# Altium footprint library LimeMicroAltiumLib.PcbLib: 876 footprints (part 14 of 57)
Each footprint in its own frame and in the unit in brackets; x right, y up, seen from the top. Pads: shape width x height; smd on the part's side, far side on the other; paste and mask are expansions set on the pad; w line width, h text height; cw(c..) or ccw(c..) is an arc to the next point about the centre after c.
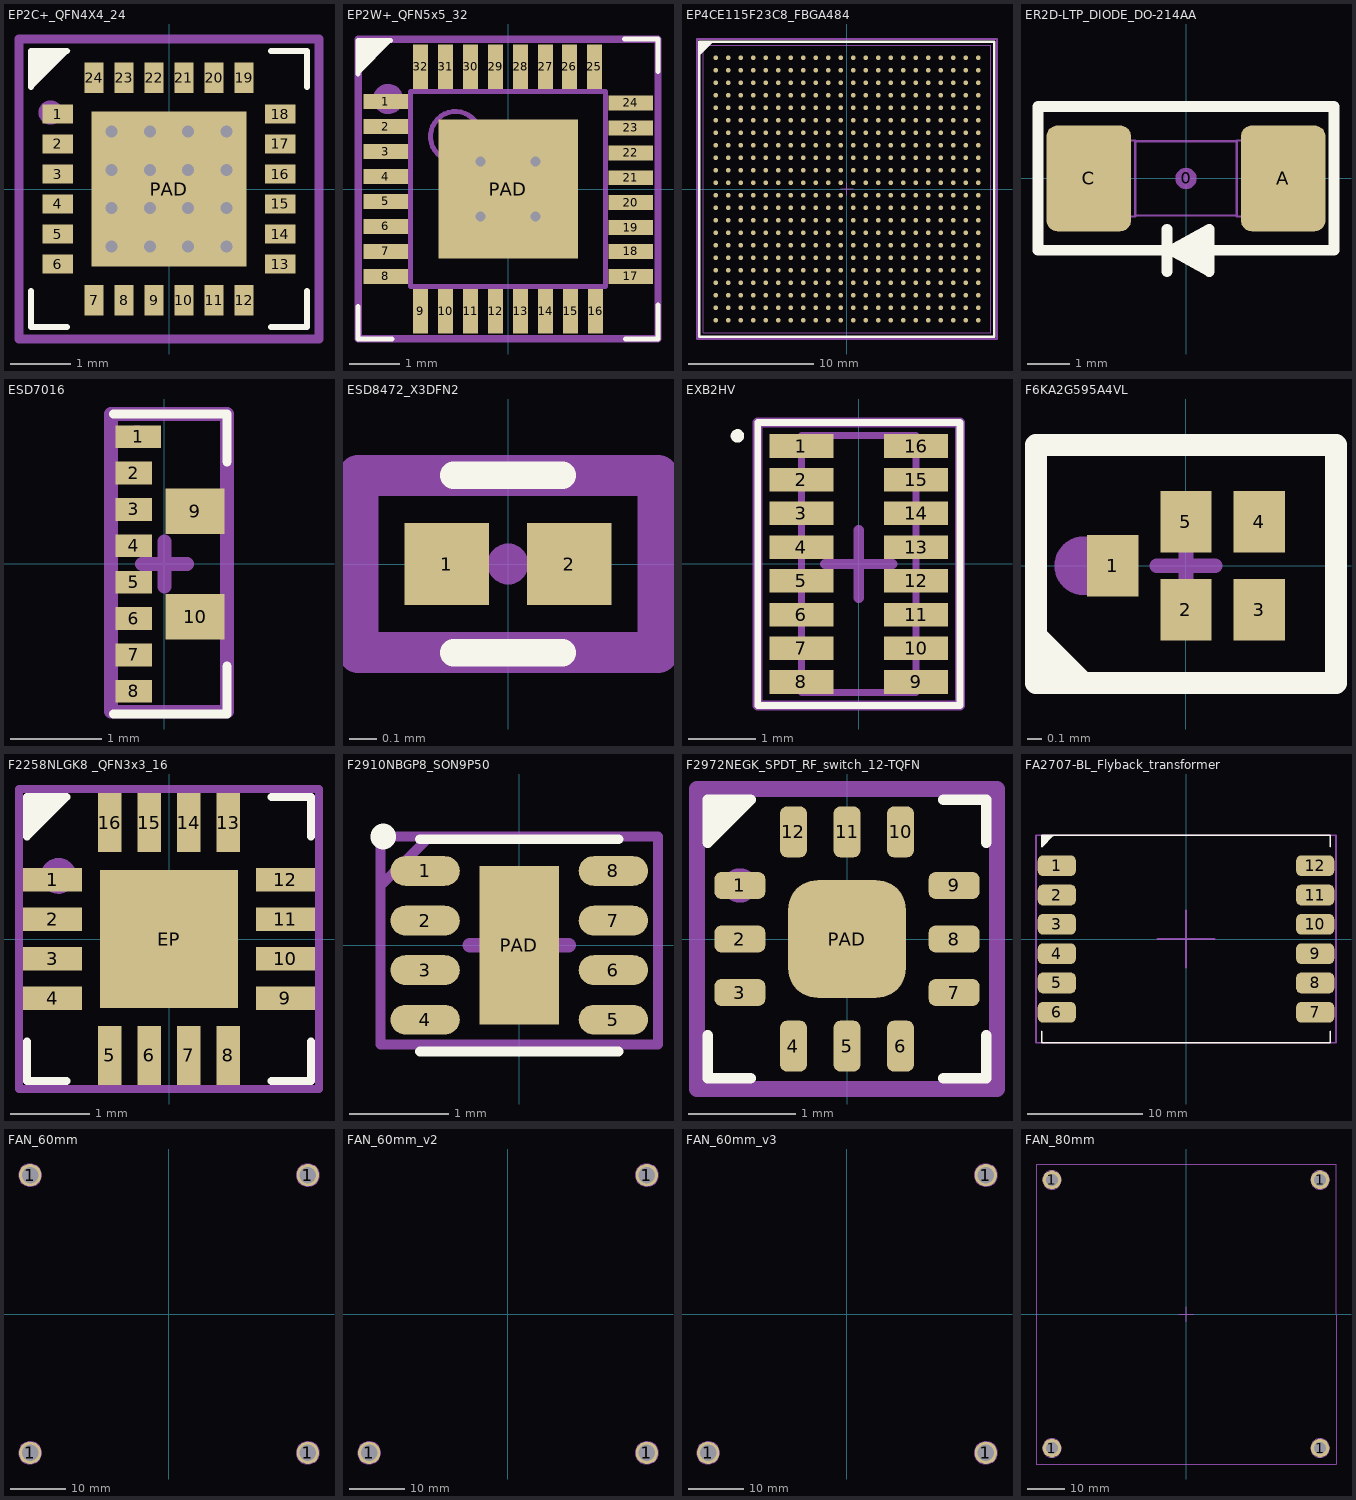
[diagram p13: the footprints below, top view; thin cyan lines are the x and y axes]

## EP2C+_QFN4X4_24 [mm]
pads (25):
  rect 0.51x0.31 smd mask+0.05: 1(-1.855,1.25) 2(-1.855,0.75) 3(-1.855,0.25) 4(-1.855,-0.25) 5(-1.855,-0.75) 6(-1.855,-1.25) 13(1.855,-1.25) 14(1.855,-0.75) 15(1.855,-0.25) 16(1.855,0.25) 17(1.855,0.75) 18(1.855,1.25)
  rect 0.31x0.51 smd mask+0.05: 7(-1.25,-1.855) 8(-0.75,-1.855) 9(-0.25,-1.855) 10(0.25,-1.855) 11(0.75,-1.855) 12(1.25,-1.855) 19(1.25,1.855) 20(0.75,1.855) 21(0.25,1.855) 22(-0.25,1.855) 23(-0.75,1.855) 24(-1.25,1.855)
  rect 2.59x2.59 smd mask+0.05: PAD(0,0)
via -0.96,0.96 diameter 0.4 hole 0.2
via -0.32,0.96 diameter 0.4 hole 0.2
via 0.32,0.96 diameter 0.4 hole 0.2
via 0.96,0.96 diameter 0.4 hole 0.2
via -0.96,0.32 diameter 0.4 hole 0.2
via -0.32,0.32 diameter 0.4 hole 0.2
via 0.32,0.32 diameter 0.4 hole 0.2
via 0.96,0.32 diameter 0.4 hole 0.2
via 0.96,-0.32 diameter 0.4 hole 0.2
via 0.96,-0.96 diameter 0.4 hole 0.2
via 0.32,-0.32 diameter 0.4 hole 0.2
via 0.32,-0.96 diameter 0.4 hole 0.2
via -0.96,-0.96 diameter 0.4 hole 0.2
via -0.32,-0.96 diameter 0.4 hole 0.2
via -0.32,-0.32 diameter 0.4 hole 0.2
via -0.96,-0.32 diameter 0.4 hole 0.2
Top Overlay:
  region: -2.3,2.3 -1.65,2.3 -2.3,1.65
  lines w0.1: -2.3,-1.7 -2.3,-2.3 -1.7,-2.3 ; -2.3,1.7 -2.3,2.3 -1.7,2.3 ; 1.7,-2.3 2.3,-2.3 2.3,-1.7 ; 1.7,2.3 2.3,2.3 2.3,1.7
Mechanical 15:
  circle w0.3: c-1.975,1.275 r0.05
  lines w0.15: -0.2,0 0.2,0 ; 0,-0.2 0,0.2 ; -2.5,-2.5 -2.5,2.5 2.5,2.5 2.5,-2.5 -2.5,-2.5
  text ".Designator" at 0,0 h0.55
3D body "User Library-QFN 24 4x4.step": height 0.9, standoff 0, extent -2.002,-2.002 2.002,2.002

## EP2W+_QFN5x5_32 [mm] "QFN, 24-Leads, Body 4,00x4,00mm, Pitch 0,50mm, Thermal Pad 2,55x2,55mm, IPC Medium Density"
height 0.8
pads (33):
  rect 0.89x0.3 smd mask+0.05: 1(-2.45,1.75) 2(-2.45,1.25) 3(-2.45,0.75) 4(-2.45,0.25) 5(-2.45,-0.25) 6(-2.45,-0.75) 7(-2.45,-1.25) 8(-2.45,-1.75) 17(2.45,-1.75) 18(2.45,-1.25) 19(2.45,-0.775) 20(2.45,-0.275) 21(2.45,0.225) 22(2.45,0.725) 23(2.45,1.225) 24(2.45,1.725)
  rect 0.3x0.89 smd mask+0.05: 9(-1.75,-2.45) 10(-1.25,-2.45) 11(-0.75,-2.45) 12(-0.25,-2.45) 13(0.25,-2.45) 14(0.75,-2.45) 15(1.25,-2.45) 16(1.75,-2.45) 25(1.725,2.45) 26(1.225,2.45) 27(0.75,2.45) 28(0.25,2.45) 29(-0.25,2.45) 30(-0.75,2.45) 31(-1.25,2.45) 32(-1.75,2.45)
  rect 2.79x2.79 smd paste+0.405 mask+0.405: PAD(0,0)
via -0.55,0.55 diameter 0.5 hole 0.2
via 0.55,0.55 diameter 0.5 hole 0.2
via -0.55,-0.55 diameter 0.5 hole 0.2
via 0.55,-0.55 diameter 0.5 hole 0.2
Top Overlay:
  region: -3,2.275 -2.313,2.962 -3,2.963
  lines w0.1: -3,-2.35 -3,-3 -2.325,-3 ; -3,2.3 -3,2.975 -2.35,2.975 ; 2.325,3 3,3 3,2.35 ; 2.35,-3 3,-3 3,-2.325
Mechanical 13:
  circle w0.1: c-1.05,1.05 r0.5
  lines w0.1: -1.95,-1.95 -1.95,1.95 1.95,1.95 1.95,-1.95 -1.95,-1.95
Mechanical 15:
  circle w0.4: c-2.4,1.8 r0.1
  lines w0.15: -0.5,0 0.5,0 ; 0,-0.5 0,0.5 ; -3,-3 -3,3 3,3 3,-3 -3,-3
  text ".Designator" at 0,0 h0.55
3D body "User Library-qfn32-5x5.step": height 0.8, standoff 0, extent -2.52,-2.51 2.501,2.51

## EP4CE115F23C8_FBGA484 [mm] "BGA, 484-Leads, Body 23x23mm, Pitch 1mm"
pads (484):
  round 0.38 smd: A1(-10.5,10.5) A2(-9.5,10.5) A3(-8.5,10.5) A4(-7.5,10.5) A5(-6.5,10.5) A6(-5.5,10.5) A7(-4.5,10.5) A8(-3.5,10.5) A9(-2.5,10.5) A10(-1.5,10.5) A11(-0.5,10.5) A12(0.5,10.5) A13(1.5,10.5) A14(2.5,10.5) A15(3.5,10.5) A16(4.5,10.5) A17(5.5,10.5) A18(6.5,10.5) A19(7.5,10.5) A20(8.5,10.5) A21(9.5,10.5) A22(10.5,10.5) AA1(-10.5,-9.5) AA2(-9.5,-9.5) AA3(-8.5,-9.5) AA4(-7.5,-9.5) AA5(-6.5,-9.5) AA6(-5.5,-9.5) AA7(-4.5,-9.5) AA8(-3.5,-9.5) AA9(-2.5,-9.5) AA10(-1.5,-9.5) AA11(-0.5,-9.5) AA12(0.5,-9.5) AA13(1.5,-9.5) AA14(2.5,-9.5) AA15(3.5,-9.5) AA16(4.5,-9.5) AA17(5.5,-9.5) AA18(6.5,-9.5) AA19(7.5,-9.5) AA20(8.5,-9.5) AA21(9.5,-9.5) AA22(10.5,-9.5) AB1(-10.5,-10.5) AB2(-9.5,-10.5) AB3(-8.5,-10.5) AB4(-7.5,-10.5) AB5(-6.5,-10.5) AB6(-5.5,-10.5) AB7(-4.5,-10.5) AB8(-3.5,-10.5) AB9(-2.5,-10.5) AB10(-1.5,-10.5) AB11(-0.5,-10.5) AB12(0.5,-10.5) AB13(1.5,-10.5) AB14(2.5,-10.5) AB15(3.5,-10.5) AB16(4.5,-10.5) AB17(5.5,-10.5) AB18(6.5,-10.5) AB19(7.5,-10.5) AB20(8.5,-10.5) AB21(9.5,-10.5) AB22(10.5,-10.5) B1(-10.5,9.5) B2(-9.5,9.5) B3(-8.5,9.5) B4(-7.5,9.5) B5(-6.5,9.5) B6(-5.5,9.5) B7(-4.5,9.5) B8(-3.5,9.5) B9(-2.5,9.5) B10(-1.5,9.5) B11(-0.5,9.5) B12(0.5,9.5) B13(1.5,9.5) B14(2.5,9.5) B15(3.5,9.5) B16(4.5,9.5) B17(5.5,9.5) B18(6.5,9.5) B19(7.5,9.5) B20(8.5,9.5) B21(9.5,9.5) B22(10.5,9.5) C1(-10.5,8.5) C2(-9.5,8.5) C3(-8.5,8.5) C4(-7.5,8.5) C5(-6.5,8.5) C6(-5.5,8.5) C7(-4.5,8.5) C8(-3.5,8.5) C9(-2.5,8.5) C10(-1.5,8.5) C11(-0.5,8.5) C12(0.5,8.5) C13(1.5,8.5) C14(2.5,8.5) C15(3.5,8.5) C16(4.5,8.5) C17(5.5,8.5) C18(6.5,8.5) C19(7.5,8.5) C20(8.5,8.5) C21(9.5,8.5) C22(10.5,8.5) D1(-10.5,7.5) D2(-9.5,7.5) D3(-8.5,7.5) D4(-7.5,7.5) D5(-6.5,7.5) D6(-5.5,7.5) D7(-4.5,7.5) D8(-3.5,7.5) D9(-2.5,7.5) D10(-1.5,7.5) D11(-0.5,7.5) D12(0.5,7.5) D13(1.5,7.5) D14(2.5,7.5) D15(3.5,7.5) D16(4.5,7.5) D17(5.5,7.5) D18(6.5,7.5) D19(7.5,7.5) D20(8.5,7.5) D21(9.5,7.5) D22(10.5,7.5) E1(-10.5,6.5) E2(-9.5,6.5) E3(-8.5,6.5) E4(-7.5,6.5) E5(-6.5,6.5) E6(-5.5,6.5) E7(-4.5,6.5) E8(-3.5,6.5) E9(-2.5,6.5) E10(-1.5,6.5) E11(-0.5,6.5) E12(0.5,6.5) E13(1.5,6.5) E14(2.5,6.5) E15(3.5,6.5) E16(4.5,6.5) E17(5.5,6.5) E18(6.5,6.5) E19(7.5,6.5) E20(8.5,6.5) E21(9.5,6.5) E22(10.5,6.5) F1(-10.5,5.5) F2(-9.5,5.5) F3(-8.5,5.5) F4(-7.5,5.5) F5(-6.5,5.5) F6(-5.5,5.5) F7(-4.5,5.5) F8(-3.5,5.5) F9(-2.5,5.5) F10(-1.5,5.5) F11(-0.5,5.5) F12(0.5,5.5) F13(1.5,5.5) F14(2.5,5.5) F15(3.5,5.5) F16(4.5,5.5) F17(5.5,5.5) F18(6.5,5.5) F19(7.5,5.5) F20(8.5,5.5) F21(9.5,5.5) F22(10.5,5.5) G1(-10.5,4.5) G2(-9.5,4.5) G3(-8.5,4.5) G4(-7.5,4.5) G5(-6.5,4.5) G6(-5.5,4.5) G7(-4.5,4.5) G8(-3.5,4.5) G9(-2.5,4.5) G10(-1.5,4.5) G11(-0.5,4.5) G12(0.5,4.5) G13(1.5,4.5) G14(2.5,4.5) G15(3.5,4.5) G16(4.5,4.5) G17(5.5,4.5) G18(6.5,4.5) G19(7.5,4.5) G20(8.5,4.5) G21(9.5,4.5) G22(10.5,4.5) H1(-10.5,3.5) H2(-9.5,3.5) H3(-8.5,3.5) H4(-7.5,3.5) H5(-6.5,3.5) H6(-5.5,3.5) H7(-4.5,3.5) H8(-3.5,3.5) H9(-2.5,3.5) H10(-1.5,3.5) H11(-0.5,3.5) H12(0.5,3.5) H13(1.5,3.5) H14(2.5,3.5) H15(3.5,3.5) H16(4.5,3.5) H17(5.5,3.5) H18(6.5,3.5) H19(7.5,3.5) H20(8.5,3.5) H21(9.5,3.5) H22(10.5,3.5) J1(-10.5,2.5) J2(-9.5,2.5) J3(-8.5,2.5) J4(-7.5,2.5) J5(-6.5,2.5) J6(-5.5,2.5) J7(-4.5,2.5) J8(-3.5,2.5) J9(-2.5,2.5) J10(-1.5,2.5) J11(-0.5,2.5) J12(0.5,2.5) J13(1.5,2.5) J14(2.5,2.5) J15(3.5,2.5) J16(4.5,2.5) J17(5.5,2.5) J18(6.5,2.5) J19(7.5,2.5) J20(8.5,2.5) J21(9.5,2.5) J22(10.5,2.5) K1(-10.5,1.5) K2(-9.5,1.5) K3(-8.5,1.5) K4(-7.5,1.5) K5(-6.5,1.5) K6(-5.5,1.5) K7(-4.5,1.5) K8(-3.5,1.5) K9(-2.5,1.5) K10(-1.5,1.5) K11(-0.5,1.5) K12(0.5,1.5) K13(1.5,1.5) K14(2.5,1.5) K15(3.5,1.5) K16(4.5,1.5) K17(5.5,1.5) K18(6.5,1.5) K19(7.5,1.5) K20(8.5,1.5) K21(9.5,1.5) K22(10.5,1.5) L1(-10.5,0.5) L2(-9.5,0.5) L3(-8.5,0.5) L4(-7.5,0.5) L5(-6.5,0.5) L6(-5.5,0.5) L7(-4.5,0.5) L8(-3.5,0.5) L9(-2.5,0.5) L10(-1.5,0.5) L11(-0.5,0.5) L12(0.5,0.5) L13(1.5,0.5) L14(2.5,0.5) L15(3.5,0.5) L16(4.5,0.5) L17(5.5,0.5) L18(6.5,0.5) L19(7.5,0.5) L20(8.5,0.5) L21(9.5,0.5) L22(10.5,0.5) M1(-10.5,-0.5) M2(-9.5,-0.5) M3(-8.5,-0.5) M4(-7.5,-0.5) M5(-6.5,-0.5) M6(-5.5,-0.5) M7(-4.5,-0.5) M8(-3.5,-0.5) M9(-2.5,-0.5) M10(-1.5,-0.5) M11(-0.5,-0.5) M12(0.5,-0.5) M13(1.5,-0.5) M14(2.5,-0.5) M15(3.5,-0.5) M16(4.5,-0.5) M17(5.5,-0.5) M18(6.5,-0.5) M19(7.5,-0.5) M20(8.5,-0.5) M21(9.5,-0.5) M22(10.5,-0.5) N1(-10.5,-1.5) N2(-9.5,-1.5) N3(-8.5,-1.5) N4(-7.5,-1.5) N5(-6.5,-1.5) N6(-5.5,-1.5) N7(-4.5,-1.5) N8(-3.5,-1.5) N9(-2.5,-1.5) N10(-1.5,-1.5) N11(-0.5,-1.5) N12(0.5,-1.5) N13(1.5,-1.5) N14(2.5,-1.5) N15(3.5,-1.5) N16(4.5,-1.5) N17(5.5,-1.5) N18(6.5,-1.5) N19(7.5,-1.5) N20(8.5,-1.5) N21(9.5,-1.5) N22(10.5,-1.5) P1(-10.5,-2.5) P2(-9.5,-2.5) P3(-8.5,-2.5) P4(-7.5,-2.5) P5(-6.5,-2.5) P6(-5.5,-2.5) P7(-4.5,-2.5) P8(-3.5,-2.5) P9(-2.5,-2.5) P10(-1.5,-2.5) P11(-0.5,-2.5) P12(0.5,-2.5) P13(1.5,-2.5) P14(2.5,-2.5) P15(3.5,-2.5) P16(4.5,-2.5) P17(5.5,-2.5) P18(6.5,-2.5) P19(7.5,-2.5) P20(8.5,-2.5) P21(9.5,-2.5) P22(10.5,-2.5) R1(-10.5,-3.5) R2(-9.5,-3.5) R3(-8.5,-3.5) R4(-7.5,-3.5) R5(-6.5,-3.5) R6(-5.5,-3.5) R7(-4.5,-3.5) R8(-3.5,-3.5) R9(-2.5,-3.5) R10(-1.5,-3.5) R11(-0.5,-3.5) R12(0.5,-3.5) R13(1.5,-3.5) R14(2.5,-3.5) R15(3.5,-3.5) R16(4.5,-3.5) R17(5.5,-3.5) R18(6.5,-3.5) R19(7.5,-3.5) R20(8.5,-3.5) R21(9.5,-3.5) R22(10.5,-3.5) T1(-10.5,-4.5) T2(-9.5,-4.5) T3(-8.5,-4.5) T4(-7.5,-4.5) T5(-6.5,-4.5) T6(-5.5,-4.5) T7(-4.5,-4.5) T8(-3.5,-4.5) T9(-2.5,-4.5) T10(-1.5,-4.5) T11(-0.5,-4.5) T12(0.5,-4.5) T13(1.5,-4.5) T14(2.5,-4.5) T15(3.5,-4.5) T16(4.5,-4.5) T17(5.5,-4.5) T18(6.5,-4.5) T19(7.5,-4.5) T20(8.5,-4.5) T21(9.5,-4.5) T22(10.5,-4.5) U1(-10.5,-5.5) U2(-9.5,-5.5) U3(-8.5,-5.5) U4(-7.5,-5.5) U5(-6.5,-5.5) U6(-5.5,-5.5) U7(-4.5,-5.5) U8(-3.5,-5.5) U9(-2.5,-5.5) U10(-1.5,-5.5) U11(-0.5,-5.5) U12(0.5,-5.5) U13(1.5,-5.5) U14(2.5,-5.5) U15(3.5,-5.5) U16(4.5,-5.5) U17(5.5,-5.5) U18(6.5,-5.5) U19(7.5,-5.5) U20(8.5,-5.5) U21(9.5,-5.5) U22(10.5,-5.5) V1(-10.5,-6.5) V2(-9.5,-6.5) V3(-8.5,-6.5) V4(-7.5,-6.5) V5(-6.5,-6.5) V6(-5.5,-6.5) V7(-4.5,-6.5) V8(-3.5,-6.5) V9(-2.5,-6.5) V10(-1.5,-6.5) V11(-0.5,-6.5) V12(0.5,-6.5) V13(1.5,-6.5) V14(2.5,-6.5) V15(3.5,-6.5) V16(4.5,-6.5) V17(5.5,-6.5) V18(6.5,-6.5) V19(7.5,-6.5) V20(8.5,-6.5) V21(9.5,-6.5) V22(10.5,-6.5) W1(-10.5,-7.5) W2(-9.5,-7.5) W3(-8.5,-7.5) W4(-7.5,-7.5) W5(-6.5,-7.5) W6(-5.5,-7.5) W7(-4.5,-7.5) W8(-3.5,-7.5) W9(-2.5,-7.5) W10(-1.5,-7.5) W11(-0.5,-7.5) W12(0.5,-7.5) W13(1.5,-7.5) W14(2.5,-7.5) W15(3.5,-7.5) W16(4.5,-7.5) W17(5.5,-7.5) W18(6.5,-7.5) W19(7.5,-7.5) W20(8.5,-7.5) W21(9.5,-7.5) W22(10.5,-7.5) Y1(-10.5,-8.5) Y2(-9.5,-8.5) Y3(-8.5,-8.5) Y4(-7.5,-8.5) Y5(-6.5,-8.5) Y6(-5.5,-8.5) Y7(-4.5,-8.5) Y8(-3.5,-8.5) Y9(-2.5,-8.5) Y10(-1.5,-8.5) Y11(-0.5,-8.5) Y12(0.5,-8.5) Y13(1.5,-8.5) Y14(2.5,-8.5) Y15(3.5,-8.5) Y16(4.5,-8.5) Y17(5.5,-8.5) Y18(6.5,-8.5) Y19(7.5,-8.5) Y20(8.5,-8.5) Y21(9.5,-8.5) Y22(10.5,-8.5)
Top Overlay:
  region: -10.8,11.8 -11.8,10.8 -11.8,11.8
  lines w0.2: -11.8,10.8 -10.8,11.8 ; -11.8,-11.8 -11.8,11.8 11.8,11.8 11.8,-11.8 -11.8,-11.8
Mechanical 13:
  lines w0.1: -11.5,-11.5 -11.5,11.5 11.5,11.5 11.5,-11.5 -11.5,-11.5
Mechanical 15:
  lines w0.1: -0.5,0 0.5,0 ; 0,-0.5 0,0.5
  lines w0.15: -12,-12 -12,12 12,12 12,-12 -12,-12
  text ".Designator" at 0,0 h0.55
  text "A1" at -11.075,10.05 h0.55
  text "A22" at 9.6,10.05 h0.55
  text "AB22" at 9.4,-11 h0.55
  text "AB1" at -11.4,-11.05 h0.55
3D body: height 2.4, standoff 0.4, extent -11.5,-11.5 11.5,11.5
3D body: height 2.4, standoff 0, extent -10.998,10.001 -10.002,10.999

## ER2D-LTP_DIODE_DO-214AA [mm]
pads (3):
  round 0.508 on Mech15: 0(0,0)
  rrect25% 2x2.5 smd: A(2.3,0) C(-2.3,0)
Top Overlay:
  lines w0.254: -0.45,-2.2 -0.45,-1.2 ; 0.05,-1.9 0.55,-1.9 ; 0.15,-1.5 0.55,-1.5 ; 0.55,-1.7 0.35,-1.7 -0.35,-1.7 ; -0.35,-1.7 0.55,-2.2 0.55,-1.2 -0.35,-1.7 ; -3.5,-1.7 -3.5,1.7 3.5,1.7 3.5,-1.7 -3.5,-1.7
Mechanical 13:
  lines w0.05: -1.2,-0.88 1.2,-0.88 ; -1.2,0.88 1.2,0.88 ; -1.7,-0.9 -1.7,0.9 -1.2,0.9 -1.2,-0.9 -1.7,-0.9 ; 1.2,-0.9 1.2,0.9 1.7,0.9 1.7,-0.9 1.2,-0.9
Mechanical 15:
  lines w0.15: -0.45,-2.2 -0.45,-1.2 ; 0.05,-1.9 0.55,-1.9 ; 0.15,-1.5 0.55,-1.5 ; 0.55,-1.7 0.35,-1.7 -0.35,-1.7 ; -0.35,-1.7 0.55,-1.2 0.55,-2.2 -0.35,-1.7 ; -3.5,-1.7 3.5,-1.7 3.5,1.7 -3.5,1.7 -3.5,-1.7
  text "A" at 1.7,-0.5 h0.55
  text "C" at -2.2,-0.5 h0.55
  text ".Designator" at 0,0 h0.55
3D body "User Library-DO-214AA SMB.step": height 2.3, standoff 0, extent -2.7,-1.8 2.7,1.8

## ESD7016 [mm]
pads (10):
  rect 0.5x0.25 smd mask+0.05: 1(-0.287,1.4)
  rect 0.4x0.25 smd mask+0.05: 2(-0.337,1) 3(-0.337,0.6) 4(-0.337,0.2) 5(-0.337,-0.2) 6(-0.337,-0.6) 7(-0.337,-1) 8(-0.337,-1.4)
  rect 0.65x0.5 smd mask+0.05: 9(0.337,0.58) 10(0.337,-0.58)
Top Overlay:
  lines w0.1: -0.562,-1.65 0.688,-1.65 0.688,-1.125 ; -0.562,1.65 0.688,1.65 0.688,1.125
Mechanical 15:
  circle w0.2: c-0.3,1.4 r0.025
  lines w0.15: -0.25,0 0,0 ; 0,-0.25 0,0 ; 0,0.25 0,0 ; 0.25,0 0,0 ; -0.587,-1.625 0.688,-1.625 0.688,1.65 -0.587,1.65 -0.587,-1.625
  text ".Designator" at 0,0 h0.55

## ESD8472_X3DFN2 [mm]
pads (2):
  rect 0.31x0.3 smd mask+0.05: 1(-0.225,0) 2(0.225,0)
Top Overlay:
  lines w0.1: -0.2,-0.325 0.2,-0.325 ; -0.2,0.325 0.2,0.325
Top Solder:
  region: -0.4,0.2 -0.4,-0.2 0.4,-0.2 0.4,0.2
Mechanical 15:
  circle w0.1: c0,0 r0.025
  lines w0.15: -0.55,-0.325 -0.55,0.325 0.55,0.325 0.55,-0.325 -0.55,-0.325
  text ".Designator" at 0,0 h0.55
3D body: height 0.33, standoff 0, extent -0.337,-0.175 0.338,0.175

## EXB2HV [mm] "Chip Array, Flat, 16-Leads, Pitch 0,50mm,  Body 3,80x1,60mm,  IPC Medium Density"
height 1
pads (16):
  rect 0.95x0.35 smd mask+0.05: 1(-0.85,1.75) 2(-0.85,1.25) 3(-0.85,0.75) 4(-0.85,0.25) 5(-0.85,-0.25) 6(-0.85,-0.75) 7(-0.85,-1.25) 8(-0.85,-1.75) 9(0.85,-1.75) 10(0.85,-1.25) 11(0.85,-0.75) 12(0.85,-0.25) 13(0.85,0.25) 14(0.85,0.75) 15(0.85,1.25) 16(0.85,1.75)
Top Overlay:
  circle w0.1: c-1.8,1.9 r0.05
  lines w0.1: -1.5,-2.1 -1.5,2.1 1.5,2.1 1.5,-2.1 -1.5,-2.1
Top Solder:
  region: 0.325,-1.975 1.375,-1.975 1.375,1.975 0.325,1.975
  region: -1.375,-1.975 -0.325,-1.975 -0.325,1.975 -1.375,1.975
Mechanical 13:
  lines w0.1: -0.85,-1.905 -0.85,1.905 0.85,1.905 0.85,-1.905 -0.85,-1.905
Mechanical 15:
  circle w0.1: c-0.875,1.725 r0.035
  lines w0.15: -0.5,0 0.5,0 ; 0,-0.5 0,0.5 ; -1.5,-2.1 1.5,-2.1 1.5,2.1 -1.5,2.1 -1.5,-2.1
  text ".Designator" at 0,0 h0.55
3D body "User Library-YC248-1.step": height 0.45, standoff 0, extent -0.8,-2 0.8,2

## F6KA2G595A4VL [mm]
pads (5):
  rect 0.35x0.42 smd mask+0.025: 1(-0.5,0) 2(0,-0.3) 3(0.5,-0.3) 4(0.5,0.3) 5(0,0.3)
Top Overlay:
  region: -1.025,-0.375 -0.6,-0.8 -1.025,-0.8
  lines w0.15: -1.025,-0.8 -1.025,0.825 1.025,0.825 1.025,-0.8 -1.025,-0.8
Mechanical 15:
  circle w0.2: c-0.7,0 r0.1
  lines w0.1: -0.2,0 0.2,0 ; 0,-0.2 0,0.2 ; -1.025,-0.8 1.025,-0.8 1.025,0.825 -1.025,0.825 -1.025,-0.8
  text ".Designator" at 0.075,0 h0.55
3D body: height 0.4, standoff 0, extent -0.7,-0.55 0.7,0.55

## F2258NLGK8 _QFN3x3_16 [mm]
pads (17):
  rect 0.75x0.3 smd mask+0.05: 1(-1.475,0.75) 2(-1.475,0.25) 3(-1.475,-0.25) 4(-1.475,-0.75) 9(1.475,-0.75) 10(1.475,-0.25) 11(1.475,0.25) 12(1.475,0.75)
  rect 0.3x0.75 smd mask+0.05: 5(-0.75,-1.475) 6(-0.25,-1.475) 7(0.25,-1.475) 8(0.75,-1.475) 13(0.75,1.475) 14(0.25,1.475) 15(-0.25,1.475) 16(-0.75,1.475)
  rect 1.75x1.75 smd mask+0.05: EP(0,0)
Top Overlay:
  region: -1.8,1.3 -1.3,1.8 -1.8,1.8
  lines w0.1: -1.8,-1.3 -1.8,-1.8 -1.3,-1.8 ; 1.3,-1.8 1.8,-1.8 1.8,-1.3 ; 1.3,1.8 1.8,1.8 1.8,1.3 ; -1.8,1.3 -1.3,1.8 -1.8,1.8 -1.8,1.3
Mechanical 15:
  circle w0.254: c-1.4,0.8 r0.1
  lines w0.1: -0.2,0 0,0 ; 0,-0.2 0,0 ; 0,0.2 0,0 ; 0.2,0 0,0 ; -1.9,-1.9 1.9,-1.9 1.9,1.9 -1.9,1.9 -1.9,-1.9
  text ".Designator" at 0,0 h0.55
3D body "AD8338ACPZ-R7.stp": height 0.8, standoff 0, extent -1.55,-1.55 1.55,1.55

## F2910NBGP8_SON9P50 [mm] "Small Outline No-Lead (SON with Tab), 0.50 mm pitch; 8 pin, 2.00 mm L X 2.00 mm W X 1.00 mm H body"
height 1
pads (9):
  rrect100% 0.7x0.3 smd paste-0.025 mask+0.05: 1(-0.95,0.75) 2(-0.95,0.25) 3(-0.95,-0.25) 4(-0.95,-0.75) 5(0.95,-0.75) 6(0.95,-0.25) 7(0.95,0.25) 8(0.95,0.75)
  rect 0.8x1.6 smd paste-0.025 mask+0.05: PAD(0,0)
Top Overlay:
  lines w0.1: -1,-1.07 1,-1.07 ; -1,1.07 1,1.07
  lines w0.255: -1.373,1.093 ccw(c-1.5,1.1) -1.372,1.1
Mechanical 15:
  circle w0.127: c-0.912,0.762 r0.051
  lines w0.1: -1.384,0.616 -0.9,1.1 ; -1.4,-1 -1.4,1.1 1.4,1.1 1.4,-1 -1.4,-1
  lines w0.15: -0.5,0 0.5,0 ; 0,-0.5 0,0.5
  text ".Designator" at 0,0 h0.55
3D body "SON9P50_200X200X100L30X25T160X80.STEP": height 1, standoff 0, extent -1.05,-1 1.05,1

## F2972NEGK_SPDT_RF_switch_12-TQFN [mm]
pads (13):
  rrect50% 0.475x0.25 smd mask+0.05: 1(-1,0.5) 2(-1,0) 3(-1,-0.5) 7(1,-0.5) 8(1,0) 9(1,0.5)
  rrect50% 0.25x0.475 smd mask+0.05: 4(-0.5,-1) 5(0,-1) 6(0.5,-1) 10(0.5,1) 11(0,1) 12(-0.5,1)
  rrect50% 1.1x1.1 smd mask+0.05: PAD(0,0)
Top Overlay:
  region: -1.3,0.9 -1.3,1.3 -0.95,1.3 -0.925,1.275
  lines w0.1: -1.3,-0.9 -1.3,-1.3 -0.9,-1.3 ; 0.9,-1.3 1.3,-1.3 1.3,-0.9 ; 0.9,1.3 1.3,1.3 1.3,0.9 ; -1.3,0.9 -1.3,1.3 -0.9,1.3 -1.3,0.9
Top Solder:
  region: -0.75,-0.675
Mechanical 15:
  circle w0.25: c-1,0.5 r0.035
  lines w0.15: -0.2,0 0.2,0 ; 0,-0.2 0,0.2 ; -1.4,-1.4 -1.4,1.4 1.4,1.4 1.4,-1.4 -1.4,-1.4
  text ".Designator" at 0,0 h0.55
3D body: height 0.55, standoff 0, extent -1,-1 1,1
3D body: height 0.58, standoff 0.53, extent -0.873,0.476 -0.475,0.875

## FA2707-BL_Flyback_transformer [mm]
pads (12):
  rrect50% 3.3x1.8 smd mask+0.1: 1(-11.2,6.35) 2(-11.2,3.81) 3(-11.2,1.27) 4(-11.2,-1.27) 5(-11.2,-3.81) 6(-11.2,-6.35) 7(11.2,-6.35) 8(11.2,-3.81) 9(11.2,-1.27) 10(11.2,1.27) 11(11.2,3.81) 12(11.2,6.35)
Top Overlay:
  region: -12.5,8 -11.5,9 -12.5,9
  lines w0.15: -12.5,-8 -12.5,-9 12.5,-9 12.5,-8 ; -11.525,8.975 -12.5,8 -12.5,9 12.5,9 12.5,8
Mechanical 15:
  lines w0.15: -2.5,0 2.5,0 ; 0,-2.5 0,2.5 ; -13,-9 -13,9 13,9 13,-9 -13,-9
  text ".Designator" at 0,0 h0.55
  text "1" at -11.5,5.5 h0.55
  text "6" at -11.5,-7 h0.55
  text "7" at 11,-7 h0.55
  text "12" at 10.5,5.5 h0.55
3D body "Coilcraft-FA2707-BL.step": height 9.7, standoff 0, extent -12.065,-8.7 12.065,8.7

## FAN_60mm [mm]
height 20
pads (4):
  round 4 hole 3 mask+0.05: 1(-25,-25) 1(-25,25) 1(25,-25) 1(25,25)
Mechanical 1:
  circle w0.25: c-25,25 r2
  circle w0.25: c-25,25 r1.501
  circle w0.25: c-25,-25 r1.501
  circle w0.25: c-25,-25 r2
  circle w0.25: c25,-25 r1.501
  circle w0.25: c25,-25 r2
  circle w0.25: c25,25 r1.501
  circle w0.25: c25,25 r2
3D body: height 15, standoff 0, extent 23,23 27,27
3D body: height 15, standoff 0, extent 23,-27 27,-23
3D body: height 15, standoff 0, extent -27,-27 -23,-23
3D body: height 15, standoff 0, extent -27,23 -23,27
3D body "612FL_ebm-papst.step": height 23, standoff 8, extent -30,-30 30,30

## FAN_60mm_v2 [mm]
height 20
pads (3):
  round 4 hole 3 mask+0.05: 1(-25,-25) 1(25,-25) 1(25,25)
Mechanical 1:
  circle w0.25: c-25,-25 r1.501
  circle w0.25: c-25,-25 r2
  circle w0.25: c25,-25 r1.501
  circle w0.25: c25,-25 r2
  circle w0.25: c25,25 r1.501
  circle w0.25: c25,25 r2
3D body: height 15, standoff 0, extent 23,23 27,27
3D body: height 15, standoff 0, extent 23,-27 27,-23
3D body: height 15, standoff 0, extent -27,-27 -23,-23
3D body: height 15, standoff 0, extent -27,23 -23,27
3D body "612FL_ebm-papst.step": height 23, standoff 8, extent -30,-30 30,30

## FAN_60mm_v3 [mm]
height 15
pads (3):
  round 4 hole 3 mask+0.05: 1(-25,-25) 1(25,-25) 1(25,25)
Mechanical 1:
  circle w0.25: c25,25 r2
  circle w0.25: c25,25 r1.501
  circle w0.25: c25,-25 r2
  circle w0.25: c25,-25 r1.501
  circle w0.25: c-25,-25 r2
  circle w0.25: c-25,-25 r1.501
3D body "User Library-Hexagonal Threaded Standoffs; length 10mm; key 5mm; M3x10mm.step": height 10, standoff 0, extent -27.887,22.5 -22.113,27.5
3D body "User Library-Hexagonal Threaded Standoffs; length 10mm; key 5mm; M3x10mm.step": height 10, standoff 0, extent 22.113,22.5 27.887,27.5
3D body "User Library-Hexagonal Threaded Standoffs; length 10mm; key 5mm; M3x10mm.step": height 10, standoff 0, extent 22.113,-27.5 27.887,-22.5
3D body "User Library-fan 60mm x 15mm hf.step": height 25, standoff 10, extent -30,-30 30,30
3D body "User Library-Hexagonal Threaded Standoffs; length 10mm; key 5mm; M3x10mm.step": height 10, standoff 0, extent -27.887,-27.5 -22.113,-22.5
3D body "User Library-M2_5-A4-socket-cap-screw-din 912.step": height 4.4, standoff -4.1, extent -27.25,-27.25 -22.75,-22.75
3D body "User Library-M2_5-A4-socket-cap-screw-din 912.step": height 4.4, standoff -4.1, extent 22.75,-27.25 27.25,-22.75
3D body "User Library-M2_5-A4-socket-cap-screw-din 912.step": height 4.4, standoff -4.1, extent 22.75,22.75 27.25,27.25

## FAN_80mm [mm]
height 20
pads (4):
  round 5 hole 3.2 mask+0.05: 1(-35.75,-35.75) 1(-35.75,35.75) 1(35.75,-35.75) 1(35.75,35.75)
Mechanical 1:
  circle w0.25: c35.75,-35.75 r1.6
  circle w0.25: c35.75,-35.75 r2.5
  circle w0.25: c35.75,35.75 r1.6
  circle w0.25: c35.75,35.75 r2.5
  circle w0.25: c-35.75,35.75 r1.6
  circle w0.25: c-35.75,35.75 r2.5
  circle w0.25: c-35.75,-35.75 r2.5
  circle w0.25: c-35.75,-35.75 r1.6
Mechanical 15:
  circle w0.25: c-35.75,-35.75 r2.5
  circle w0.25: c-35.75,-35.75 r1.6
  circle w0.25: c-35.75,35.75 r2.5
  circle w0.25: c-35.75,35.75 r1.6
  circle w0.25: c35.75,-35.75 r2.5
  circle w0.25: c35.75,-35.75 r1.6
  circle w0.25: c35.75,35.75 r2.5
  circle w0.25: c35.75,35.75 r1.6
  lines w0.15: -2,0 0,0 ; 0,-2 0,0 ; 0,2 0,0 ; 2,0 0,0
  lines w0.3: -40,-40 -40,40 40,40 40,-40 -40,-40
  text ".Designator" at 0,0 h0.55
  text "FAN" at -3,-38 h1.5
3D body: height 15, standoff 0, extent 33.75,33.75 37.75,37.75
3D body: height 15, standoff 0, extent 33.75,-37.75 37.75,-33.75
3D body: height 15, standoff 0, extent -37.75,-37.75 -33.75,-33.75
3D body: height 15, standoff 0, extent -37.75,33.75 -33.75,37.75
3D body "fan_me80201v3-000u-a99.stp": height 30, standoff 10, extent -40,-40 66.337,40